# Altium integrated library Capacitor 0603 1nF.IntLib: 1 symbol
Pins are listed as number, name and electrical type; pins without a type are passive.

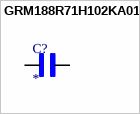
[diagram p0: symbol GRM188R71H102KA01D]

## GRM188R71H102KA01D
designator C?
SMD Capacitor X7R(EIA) with Capacitance: 1000pF Tol. 10%. Rated Voltage: 50Vdc; MF: Murata; MP: GRM188R71H102KA01D; SnapEDA_Link: https://www.snapeda.com/parts/GRM188R71H102KA01D/Murata/view-part/?ref=snap; Package: 1608 Murata; Value: *; Check_prices: https://www.snapeda.com/parts/GRM188R71H102KA01D/Murata/view-part/?ref=eda
footprint CAPC1608X90N
pins: 1, 2